# Altium footprint library 2.10-LQFP封装.PcbLib: 97 footprints (part 2 of 7)
Each footprint in its own frame and in the unit in brackets; x right, y up, seen from the top. Pads: shape width x height; smd on the part's side, far side on the other; paste and mask are expansions set on the pad; w line width, h text height; cw(c..) or ccw(c..) is an arc to the next point about the centre after c.
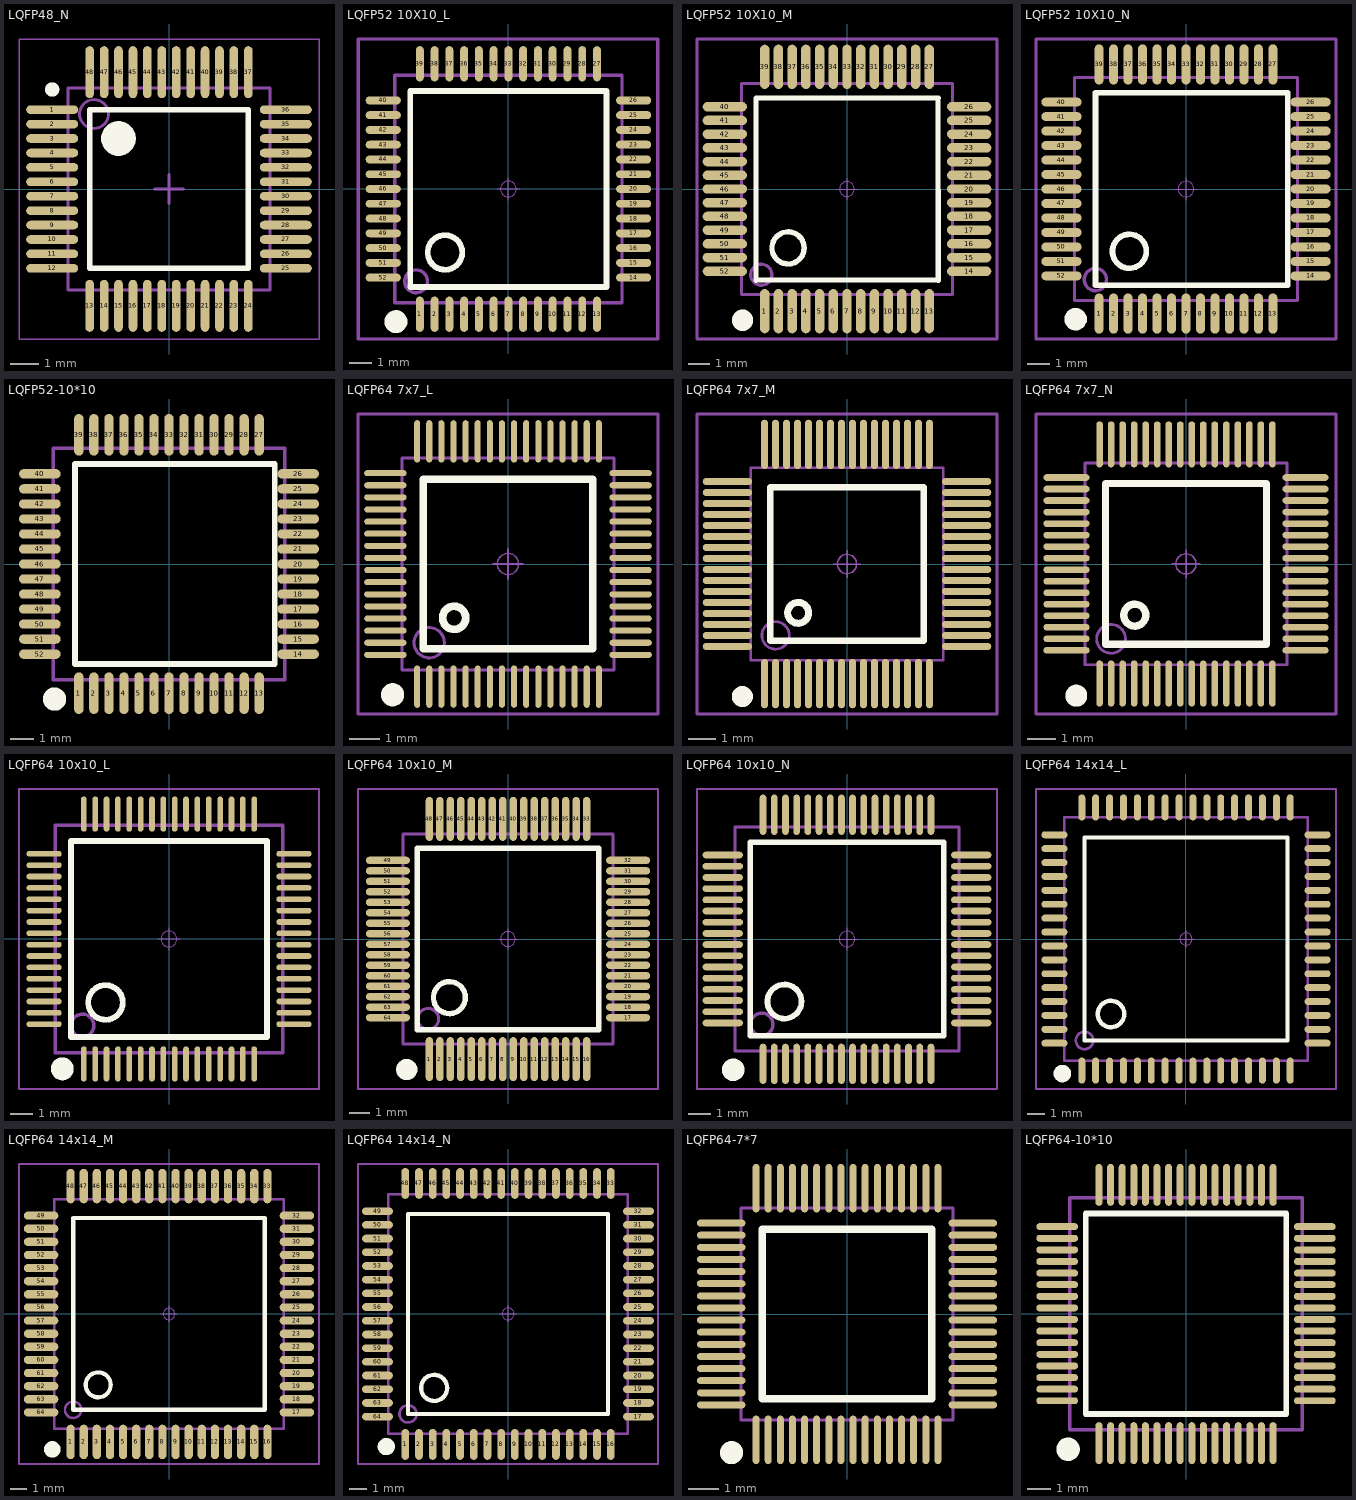
[diagram p1: the footprints below, top view; thin cyan lines are the x and y axes]

## LQFP48_N [mm] "封装库来自淘宝 ID：黄晶宝石 Thin QFP, 48-Leads, Body 7x7mm, Pitch 0.5mm, IPC Medium Density"
height 1.6
pads (48):
  oval 1.8x0.3 smd: 1(-4.05,2.75) 2(-4.05,2.25) 3(-4.05,1.75) 4(-4.05,1.25) 5(-4.05,0.75) 6(-4.05,0.25) 7(-4.05,-0.25) 8(-4.05,-0.75) 9(-4.05,-1.25) 10(-4.05,-1.75) 11(-4.05,-2.25) 12(-4.05,-2.75) 25(4.05,-2.75) 26(4.05,-2.25) 27(4.05,-1.75) 28(4.05,-1.25) 29(4.05,-0.75) 30(4.05,-0.25) 31(4.05,0.25) 32(4.05,0.75) 33(4.05,1.25) 34(4.05,1.75) 35(4.05,2.25) 36(4.05,2.75)
  oval 0.3x1.8 smd: 13(-2.75,-4.05) 14(-2.25,-4.05) 15(-1.75,-4.05) 16(-1.25,-4.05) 17(-0.75,-4.05) 18(-0.25,-4.05) 19(0.25,-4.05) 20(0.75,-4.05) 21(1.25,-4.05) 22(1.75,-4.05) 23(2.25,-4.05) 24(2.75,-4.05) 37(2.75,4.05) 38(2.25,4.05) 39(1.75,4.05) 40(1.25,4.05) 41(0.75,4.05) 42(0.25,4.05) 43(-0.25,4.05) 44(-0.75,4.05) 45(-1.25,4.05) 46(-1.75,4.05) 47(-2.25,4.05) 48(-2.75,4.05)
Top Overlay:
  circle w0.6: c-1.75,1.75 r0.3
  circle w0.25: c-4.05,3.45 r0.125
  lines w0.2: -2.75,-2.75 2.75,-2.75 2.75,2.75 -2.75,2.75 -2.75,-2.75
Mechanical 13:
  circle w0.1: c-2.6,2.6 r0.5
  lines w0.1: -3.5,-3.5 3.5,-3.5 3.5,3.5 -3.5,3.5 -3.5,-3.5
Mechanical 15:
  lines w0.05: -5.2,-5.2 5.2,-5.2 5.2,5.2 -5.2,5.2 -5.2,-5.2
  lines w0.1: -0.5,0 0.5,0 ; 0,-0.5 0,0.5
3D body "LQFP48-7x7.STEP": height 1.45, standoff 0, extent -4.503,-4.503 4.503,4.503

## LQFP52 10X10_L [mm] "52脚，体宽10x10mm，脚距0.65mm"
height 1.6
pads (52):
  oval 0.35x1.55 smd: 1(-3.9,-5.512) 2(-3.25,-5.512) 3(-2.6,-5.512) 4(-1.95,-5.512) 5(-1.3,-5.512) 6(-0.65,-5.512) 7(0,-5.512) 8(0.65,-5.512) 9(1.3,-5.512) 10(1.95,-5.512) 11(2.6,-5.512) 12(3.25,-5.512) 13(3.9,-5.512) 27(3.9,5.512) 28(3.25,5.512) 29(2.6,5.512) 30(1.95,5.512) 31(1.3,5.512) 32(0.65,5.512) 33(0,5.512) 34(-0.65,5.512) 35(-1.3,5.512) 36(-1.95,5.512) 37(-2.6,5.512) 38(-3.25,5.512) 39(-3.9,5.512)
  oval 1.55x0.35 smd: 14(5.512,-3.9) 15(5.512,-3.25) 16(5.512,-2.6) 17(5.512,-1.95) 18(5.512,-1.3) 19(5.512,-0.65) 20(5.512,0) 21(5.512,0.65) 22(5.512,1.3) 23(5.512,1.95) 24(5.512,2.6) 25(5.512,3.25) 26(5.512,3.9) 40(-5.512,3.9) 41(-5.512,3.25) 42(-5.512,2.6) 43(-5.512,1.95) 44(-5.512,1.3) 45(-5.512,0.65) 46(-5.512,0) 47(-5.512,-0.65) 48(-5.512,-1.3) 49(-5.512,-1.95) 50(-5.512,-2.6) 51(-5.512,-3.25) 52(-5.512,-3.9)
Top Overlay:
  circle w0.508: c-4.953,-5.842 r0.25
  circle w0.254: c-2.794,-2.794 r0.762
  lines w0.254: -4.318,-4.318 4.318,-4.318 4.318,4.318 -4.318,4.318 -4.318,-4.318
Mechanical 13:
  circle w0.15: c-4.064,-4.064 r0.5
  lines w0.15: -5,-5 -5,5 5,5 5,-5 -5,-5
Mechanical 15:
  circle w0.05: c0,0 r0.35
  lines w0.05: -0.5,0 0.5,0 ; 0,-0.5 0,0.5
  lines w0.15: -6.604,-6.604 -6.604,6.604 6.567,6.604 6.567,-6.604 -6.604,-6.604
3D body "LQFP52-10x10.STEP": height 1.45, standoff -0.01, extent -6.003,-6.003 6.003,6.003

## LQFP52 10X10_M [mm] "52脚，体宽10x10mm，脚距0.65mm"
height 1.6
pads (52):
  oval 0.45x2.1 smd: 1(-3.9,-5.791) 2(-3.25,-5.791) 3(-2.6,-5.791) 4(-1.95,-5.791) 5(-1.3,-5.791) 6(-0.65,-5.791) 7(0,-5.791) 8(0.65,-5.791) 9(1.3,-5.791) 10(1.95,-5.791) 11(2.6,-5.791) 12(3.25,-5.791) 13(3.9,-5.791) 27(3.9,5.791) 28(3.25,5.791) 29(2.6,5.791) 30(1.95,5.791) 31(1.3,5.791) 32(0.65,5.791) 33(0,5.791) 34(-0.65,5.791) 35(-1.3,5.791) 36(-1.95,5.791) 37(-2.6,5.791) 38(-3.25,5.791) 39(-3.9,5.791)
  oval 2.1x0.45 smd: 14(5.791,-3.9) 15(5.791,-3.25) 16(5.791,-2.6) 17(5.791,-1.95) 18(5.791,-1.3) 19(5.791,-0.65) 20(5.791,0) 21(5.791,0.65) 22(5.791,1.3) 23(5.791,1.95) 24(5.791,2.6) 25(5.791,3.25) 26(5.791,3.9) 40(-5.791,3.9) 41(-5.791,3.25) 42(-5.791,2.6) 43(-5.791,1.95) 44(-5.791,1.3) 45(-5.791,0.65) 46(-5.791,0) 47(-5.791,-0.65) 48(-5.791,-1.3) 49(-5.791,-1.95) 50(-5.791,-2.6) 51(-5.791,-3.25) 52(-5.791,-3.9)
Top Overlay:
  circle w0.254: c-2.794,-2.794 r0.762
  circle w0.508: c-4.953,-6.223 r0.25
  lines w0.254: -4.318,-4.318 -4.318,4.318 4.318,4.318 4.318,-4.318 -4.318,-4.318
Mechanical 13:
  circle w0.15: c-4.064,-4.064 r0.5
  lines w0.15: -5,-5 -5,5 5,5 5,-5 -5,-5
Mechanical 15:
  circle w0.05: c0,0 r0.35
  lines w0.05: -0.5,0 0.5,0 ; 0,-0.5 0,0.5
  lines w0.15: -7.112,-7.112 -7.112,7.112 7.112,7.112 7.112,-7.112 -7.112,-7.112
3D body "LQFP52-10x10.STEP": height 1.45, standoff -0.01, extent -6.003,-6.003 6.003,6.003

## LQFP52 10X10_N [mm] "52脚，体宽10x10mm，脚距0.65mm"
height 1.6
pads (52):
  oval 0.4x1.8 smd: 1(-3.9,-5.588) 2(-3.25,-5.588) 3(-2.6,-5.588) 4(-1.95,-5.588) 5(-1.3,-5.588) 6(-0.65,-5.588) 7(0,-5.588) 8(0.65,-5.588) 9(1.3,-5.588) 10(1.95,-5.588) 11(2.6,-5.588) 12(3.25,-5.588) 13(3.9,-5.588) 27(3.9,5.588) 28(3.25,5.588) 29(2.6,5.588) 30(1.95,5.588) 31(1.3,5.588) 32(0.65,5.588) 33(0,5.588) 34(-0.65,5.588) 35(-1.3,5.588) 36(-1.95,5.588) 37(-2.6,5.588) 38(-3.25,5.588) 39(-3.9,5.588)
  oval 1.8x0.4 smd: 14(5.588,-3.9) 15(5.588,-3.25) 16(5.588,-2.6) 17(5.588,-1.95) 18(5.588,-1.3) 19(5.588,-0.65) 20(5.588,0) 21(5.588,0.65) 22(5.588,1.3) 23(5.588,1.95) 24(5.588,2.6) 25(5.588,3.25) 26(5.588,3.9) 40(-5.588,3.9) 41(-5.588,3.25) 42(-5.588,2.6) 43(-5.588,1.95) 44(-5.588,1.3) 45(-5.588,0.65) 46(-5.588,0) 47(-5.588,-0.65) 48(-5.588,-1.3) 49(-5.588,-1.95) 50(-5.588,-2.6) 51(-5.588,-3.25) 52(-5.588,-3.9)
Top Overlay:
  circle w0.508: c-4.953,-5.842 r0.25
  circle w0.254: c-2.54,-2.794 r0.762
  lines w0.254: -4.064,-4.318 4.572,-4.318 4.572,4.318 -4.064,4.318 -4.064,-4.318
Mechanical 13:
  circle w0.15: c-4.064,-4.064 r0.5
  lines w0.15: -5,-5 5,-5 5,5 -5,5 -5,-5
Mechanical 15:
  circle w0.05: c0,0 r0.35
  lines w0.05: -0.5,0 0.5,0 ; 0,-0.5 0,0.5
  lines w0.15: -6.731,-6.731 6.731,-6.731 6.731,6.731 -6.731,6.731 -6.731,-6.731
3D body "LQFP52-10x10.STEP": height 1.45, standoff -0.01, extent -6.003,-6.003 6.003,6.003

## LQFP52-10*10 [mm] "10x10mm，0.65mm       淘宝ID:黄晶宝石"
height 1.6
pads (52):
  oval 0.4x1.8 smd: 1(-3.9,-5.588) 2(-3.25,-5.588) 3(-2.6,-5.588) 4(-1.95,-5.588) 5(-1.3,-5.588) 6(-0.65,-5.588) 7(0,-5.588) 8(0.65,-5.588) 9(1.3,-5.588) 10(1.95,-5.588) 11(2.6,-5.588) 12(3.25,-5.588) 13(3.9,-5.588) 27(3.9,5.588) 28(3.25,5.588) 29(2.6,5.588) 30(1.95,5.588) 31(1.3,5.588) 32(0.65,5.588) 33(0,5.588) 34(-0.65,5.588) 35(-1.3,5.588) 36(-1.95,5.588) 37(-2.6,5.588) 38(-3.25,5.588) 39(-3.9,5.588)
  oval 1.8x0.4 smd: 14(5.588,-3.9) 15(5.588,-3.25) 16(5.588,-2.6) 17(5.588,-1.95) 18(5.588,-1.3) 19(5.588,-0.65) 20(5.588,0) 21(5.588,0.65) 22(5.588,1.3) 23(5.588,1.95) 24(5.588,2.6) 25(5.588,3.25) 26(5.588,3.9) 40(-5.588,3.9) 41(-5.588,3.25) 42(-5.588,2.6) 43(-5.588,1.95) 44(-5.588,1.3) 45(-5.588,0.65) 46(-5.588,0) 47(-5.588,-0.65) 48(-5.588,-1.3) 49(-5.588,-1.95) 50(-5.588,-2.6) 51(-5.588,-3.25) 52(-5.588,-3.9)
Top Overlay:
  circle w0.508: c-4.953,-5.842 r0.25
  lines w0.254: -4.064,-4.318 -4.064,4.318 4.572,4.318 4.572,-4.318 -4.064,-4.318
Mechanical 13:
  lines w0.15: -5,-5 -5,5 5,5 5,-5 -5,-5
3D body "LQFP52-10x10.STEP": height 1.45, standoff 0, extent -6.003,-6.003 6.003,6.003

## LQFP64 7x7_L [mm] "64脚，体宽：7x7mm, 脚距：0.4mm"
pads (64):
  oval 0.2x1.4 smd: 1(-3,-4.048) 2(-2.6,-4.048) 3(-2.2,-4.048) 4(-1.8,-4.048) 5(-1.4,-4.048) 6(-1,-4.048) 7(-0.6,-4.048) 8(-0.2,-4.048) 9(0.2,-4.048) 10(0.6,-4.048) 11(1,-4.048) 12(1.4,-4.048) 13(1.8,-4.048) 14(2.2,-4.048) 15(2.6,-4.048) 16(3,-4.048) 33(3,4.048) 34(2.6,4.048) 35(2.2,4.048) 36(1.8,4.048) 37(1.4,4.048) 38(1,4.048) 39(0.6,4.048) 40(0.2,4.048) 41(-0.2,4.048) 42(-0.6,4.048) 43(-1,4.048) 44(-1.4,4.048) 45(-1.8,4.048) 46(-2.2,4.048) 47(-2.6,4.048) 48(-3,4.048)
  oval 1.4x0.2 smd: 17(4.048,-3) 18(4.048,-2.6) 19(4.048,-2.2) 20(4.048,-1.8) 21(4.048,-1.4) 22(4.048,-1) 23(4.048,-0.6) 24(4.048,-0.2) 25(4.048,0.2) 26(4.048,0.6) 27(4.048,1) 28(4.048,1.4) 29(4.048,1.8) 30(4.048,2.2) 31(4.048,2.6) 32(4.048,3) 49(-4.048,3) 50(-4.048,2.6) 51(-4.048,2.2) 52(-4.048,1.8) 53(-4.048,1.4) 54(-4.048,1) 55(-4.048,0.6) 56(-4.048,0.2) 57(-4.048,-0.2) 58(-4.048,-0.6) 59(-4.048,-1) 60(-4.048,-1.4) 61(-4.048,-1.8) 62(-4.048,-2.2) 63(-4.048,-2.6) 64(-4.048,-3)
Top Overlay:
  circle w0.254: c-1.778,-1.778 r0.381
  circle w0.508: c-3.81,-4.318 r0.127
  lines w0.254: -2.794,-2.794 2.794,-2.794 2.794,2.794 -2.794,2.794 -2.794,-2.794
Mechanical 13:
  circle w0.1: c-2.6,-2.6 r0.5
  lines w0.1: -3.5,-3.5 3.5,-3.5 3.5,3.5 -3.5,3.5 -3.5,-3.5
Mechanical 15:
  circle w0.05: c0,0 r0.35
  lines w0.05: -0.5,0 0.5,0 ; 0,-0.5 0,0.5
  lines w0.1: -4.953,-4.953 -4.953,4.953 4.953,4.953 4.953,-4.953 -4.953,-4.953
3D body "LQFP64-7x7.STEP": height 1.45, standoff 0, extent -4.503,-4.503 4.503,4.503

## LQFP64 7x7_M [mm] "64脚，体宽：7x7mm, 脚距：0.4mm"
pads (64):
  oval 0.26x1.8 smd: 1(-3,-4.352) 2(-2.6,-4.352) 3(-2.2,-4.352) 4(-1.8,-4.352) 5(-1.4,-4.352) 6(-1,-4.352) 7(-0.6,-4.352) 8(-0.2,-4.352) 9(0.2,-4.352) 10(0.6,-4.352) 11(1,-4.352) 12(1.4,-4.352) 13(1.8,-4.352) 14(2.2,-4.352) 15(2.6,-4.352) 16(3,-4.352) 33(3,4.352) 34(2.6,4.352) 35(2.2,4.352) 36(1.8,4.352) 37(1.4,4.352) 38(1,4.352) 39(0.6,4.352) 40(0.2,4.352) 41(-0.2,4.352) 42(-0.6,4.352) 43(-1,4.352) 44(-1.4,4.352) 45(-1.8,4.352) 46(-2.2,4.352) 47(-2.6,4.352) 48(-3,4.352)
  oval 1.8x0.26 smd: 17(4.352,-3) 18(4.352,-2.6) 19(4.352,-2.2) 20(4.352,-1.8) 21(4.352,-1.4) 22(4.352,-1) 23(4.352,-0.6) 24(4.352,-0.2) 25(4.352,0.2) 26(4.352,0.6) 27(4.352,1) 28(4.352,1.4) 29(4.352,1.8) 30(4.352,2.2) 31(4.352,2.6) 32(4.352,3) 49(-4.352,3) 50(-4.352,2.6) 51(-4.352,2.2) 52(-4.352,1.8) 53(-4.352,1.4) 54(-4.352,1) 55(-4.352,0.6) 56(-4.352,0.2) 57(-4.352,-0.2) 58(-4.352,-0.6) 59(-4.352,-1) 60(-4.352,-1.4) 61(-4.352,-1.8) 62(-4.352,-2.2) 63(-4.352,-2.6) 64(-4.352,-3)
Top Overlay:
  circle w0.254: c-1.778,-1.778 r0.381
  circle w0.508: c-3.81,-4.826 r0.127
  lines w0.254: -2.794,-2.794 2.794,-2.794 2.794,2.794 -2.794,2.794 -2.794,-2.794
Mechanical 13:
  circle w0.1: c-2.6,-2.6 r0.5
  lines w0.1: -3.5,-3.5 3.5,-3.5 3.5,3.5 -3.5,3.5 -3.5,-3.5
Mechanical 15:
  circle w0.05: c0,0 r0.35
  lines w0.05: -0.5,0 0.5,0 ; 0,-0.5 0,0.5
  lines w0.1: -5.461,-5.461 -5.461,5.461 5.461,5.461 5.461,-5.461 -5.461,-5.461
3D body "LQFP64-7x7.STEP": height 1.45, standoff 0, extent -4.503,-4.503 4.503,4.503

## LQFP64 7x7_N [mm] "64脚，体宽：7x7mm, 脚距：0.4mm"
pads (64):
  oval 0.23x1.6 smd: 1(-3,-4.146) 2(-2.6,-4.146) 3(-2.2,-4.146) 4(-1.8,-4.146) 5(-1.4,-4.146) 6(-1,-4.146) 7(-0.6,-4.146) 8(-0.2,-4.146) 9(0.2,-4.146) 10(0.6,-4.146) 11(1,-4.146) 12(1.4,-4.146) 13(1.8,-4.146) 14(2.2,-4.146) 15(2.6,-4.146) 16(3,-4.146) 33(3,4.152) 34(2.6,4.152) 35(2.2,4.152) 36(1.8,4.152) 37(1.4,4.152) 38(1,4.152) 39(0.6,4.152) 40(0.2,4.152) 41(-0.2,4.152) 42(-0.6,4.152) 43(-1,4.152) 44(-1.4,4.152) 45(-1.8,4.152) 46(-2.2,4.152) 47(-2.6,4.152) 48(-3,4.152)
  oval 1.6x0.23 smd: 17(4.149,-2.997) 18(4.149,-2.597) 19(4.149,-2.197) 20(4.149,-1.797) 21(4.149,-1.397) 22(4.149,-0.997) 23(4.149,-0.597) 24(4.149,-0.197) 25(4.149,0.203) 26(4.149,0.603) 27(4.149,1.003) 28(4.149,1.403) 29(4.149,1.803) 30(4.149,2.203) 31(4.149,2.603) 32(4.149,3.003) 49(-4.149,3.003) 50(-4.149,2.603) 51(-4.149,2.203) 52(-4.149,1.803) 53(-4.149,1.403) 54(-4.149,1.003) 55(-4.149,0.603) 56(-4.149,0.203) 57(-4.149,-0.197) 58(-4.149,-0.597) 59(-4.149,-0.997) 60(-4.149,-1.397) 61(-4.149,-1.797) 62(-4.149,-2.197) 63(-4.149,-2.597) 64(-4.149,-2.997)
Top Overlay:
  circle w0.254: c-1.778,-1.775 r0.381
  circle w0.508: c-3.81,-4.572 r0.127
  lines w0.254: -2.794,-2.791 2.794,-2.791 2.794,2.797 -2.794,2.797 -2.794,-2.791
Mechanical 13:
  circle w0.1: c-2.6,-2.597 r0.5
  lines w0.1: -3.5,-3.497 3.5,-3.497 3.5,3.503 -3.5,3.503 -3.5,-3.497
Mechanical 15:
  circle w0.05: c0,0.003 r0.35
  lines w0.05: -0.5,0.003 0.5,0.003 ; 0,-0.497 0,0.503
  lines w0.1: -5.207,-5.207 -5.207,5.207 5.207,5.207 5.207,-5.207 -5.207,-5.207
3D body "LQFP64-7x7.STEP": height 1.45, standoff 0, extent -4.503,-4.5 4.503,4.506

## LQFP64 10x10_L [mm] "64脚，体宽10x10mm，脚距0.5mm"
height 1.6
pads (64):
  oval 0.25x1.55 smd: 1(-3.75,-5.5) 2(-3.25,-5.5) 3(-2.75,-5.5) 4(-2.25,-5.5) 5(-1.75,-5.5) 6(-1.25,-5.5) 7(-0.75,-5.5) 8(-0.25,-5.5) 9(0.25,-5.5) 10(0.75,-5.5) 11(1.25,-5.5) 12(1.75,-5.5) 13(2.25,-5.5) 14(2.75,-5.5) 15(3.25,-5.5) 16(3.75,-5.5) 33(3.75,5.5) 34(3.25,5.5) 35(2.75,5.5) 36(2.25,5.5) 37(1.75,5.5) 38(1.25,5.5) 39(0.75,5.5) 40(0.25,5.5) 41(-0.25,5.5) 42(-0.75,5.5) 43(-1.25,5.5) 44(-1.75,5.5) 45(-2.25,5.5) 46(-2.75,5.5) 47(-3.25,5.5) 48(-3.75,5.5)
  oval 1.55x0.25 smd: 17(5.5,-3.75) 18(5.5,-3.25) 19(5.5,-2.75) 20(5.5,-2.25) 21(5.5,-1.75) 22(5.5,-1.25) 23(5.5,-0.75) 24(5.5,-0.25) 25(5.5,0.25) 26(5.5,0.75) 27(5.5,1.25) 28(5.5,1.75) 29(5.5,2.25) 30(5.5,2.75) 31(5.5,3.25) 32(5.5,3.75) 49(-5.499,3.75) 50(-5.499,3.25) 51(-5.499,2.75) 52(-5.499,2.25) 53(-5.499,1.75) 54(-5.499,1.25) 55(-5.499,0.75) 56(-5.499,0.25) 57(-5.499,-0.25) 58(-5.499,-0.75) 59(-5.499,-1.25) 60(-5.499,-1.75) 61(-5.499,-2.25) 62(-5.499,-2.75) 63(-5.499,-3.25) 64(-5.499,-3.75)
Top Overlay:
  circle w0.254: c-2.794,-2.794 r0.762
  circle w0.508: c-4.699,-5.715 r0.25
  lines w0.254: -4.318,-4.318 -4.318,4.318 4.318,4.318 4.318,-4.318 -4.318,-4.318
Mechanical 13:
  circle w0.15: c-3.81,-3.81 r0.5
  lines w0.15: -5,-5 -5,5 5,5 5,-5 -5,-5
Mechanical 15:
  circle w0.05: c0,0 r0.35
  lines w0.05: -0.5,0 0.5,0 ; 0,-0.5 0,0.5
  lines w0.1: -6.604,-6.604 -6.604,6.604 6.604,6.604 6.604,-6.604 -6.604,-6.604
3D body "LQFP64-10x10.STEP": height 1.45, standoff -0.01, extent -6.003,-6.003 6.003,6.003

## LQFP64 10x10_M [mm] "64脚，体宽10x10mm，脚距0.5mm         淘宝ID:黄晶宝石"
height 1.6
pads (64):
  oval 0.35x2.1 smd: 1(-3.75,-5.727) 2(-3.25,-5.727) 3(-2.75,-5.727) 4(-2.25,-5.727) 5(-1.75,-5.727) 6(-1.25,-5.727) 7(-0.75,-5.727) 8(-0.25,-5.727) 9(0.25,-5.727) 10(0.75,-5.727) 11(1.25,-5.727) 12(1.75,-5.727) 13(2.25,-5.727) 14(2.75,-5.727) 15(3.25,-5.727) 16(3.75,-5.727) 33(3.75,5.727) 34(3.25,5.727) 35(2.75,5.727) 36(2.25,5.727) 37(1.75,5.727) 38(1.25,5.727) 39(0.75,5.727) 40(0.25,5.727) 41(-0.25,5.727) 42(-0.75,5.727) 43(-1.25,5.727) 44(-1.75,5.727) 45(-2.25,5.727) 46(-2.75,5.727) 47(-3.25,5.727) 48(-3.75,5.727)
  oval 2.1x0.35 smd: 17(5.727,-3.75) 18(5.727,-3.25) 19(5.727,-2.75) 20(5.727,-2.25) 21(5.727,-1.75) 22(5.727,-1.25) 23(5.727,-0.75) 24(5.727,-0.25) 25(5.727,0.25) 26(5.727,0.75) 27(5.727,1.25) 28(5.727,1.75) 29(5.727,2.25) 30(5.727,2.75) 31(5.727,3.25) 32(5.727,3.75) 49(-5.727,3.75) 50(-5.727,3.25) 51(-5.727,2.75) 52(-5.727,2.25) 53(-5.727,1.75) 54(-5.727,1.25) 55(-5.727,0.75) 56(-5.727,0.25) 57(-5.727,-0.25) 58(-5.727,-0.75) 59(-5.727,-1.25) 60(-5.727,-1.75) 61(-5.727,-2.25) 62(-5.727,-2.75) 63(-5.727,-3.25) 64(-5.727,-3.75)
Top Overlay:
  circle w0.254: c-2.794,-2.794 r0.762
  circle w0.508: c-4.826,-6.223 r0.25
  lines w0.254: -4.318,-4.318 -4.318,4.318 4.318,4.318 4.318,-4.318 -4.318,-4.318
Mechanical 13:
  circle w0.15: c-3.81,-3.81 r0.5
  lines w0.15: -5,-5 -5,5 5,5 5,-5 -5,-5
Mechanical 15:
  circle w0.05: c0,0 r0.35
  lines w0.05: -0.5,0 0.5,0 ; 0,-0.5 0,0.5
  lines w0.1: -7.15,-7.15 7.15,-7.15 7.15,7.15 -7.15,7.15 -7.15,-7.15
3D body "LQFP64-10x10.STEP": height 1.45, standoff -0.01, extent -6.003,-6.003 6.003,6.003

## LQFP64 10x10_N [mm] "64脚，体宽10x10mm，脚距0.5mm      淘宝ID:黄晶宝石"
height 1.6
pads (64):
  oval 0.3x1.8 smd: 1(-3.75,-5.575) 2(-3.25,-5.575) 3(-2.75,-5.575) 4(-2.25,-5.575) 5(-1.75,-5.575) 6(-1.25,-5.575) 7(-0.75,-5.575) 8(-0.25,-5.575) 9(0.25,-5.575) 10(0.75,-5.575) 11(1.25,-5.575) 12(1.75,-5.575) 13(2.25,-5.575) 14(2.75,-5.575) 15(3.25,-5.575) 16(3.75,-5.575) 33(3.75,5.55) 34(3.25,5.55) 35(2.75,5.55) 36(2.25,5.55) 37(1.75,5.55) 38(1.25,5.55) 39(0.75,5.55) 40(0.25,5.55) 41(-0.25,5.55) 42(-0.75,5.55) 43(-1.25,5.55) 44(-1.75,5.55) 45(-2.25,5.55) 46(-2.75,5.55) 47(-3.25,5.55) 48(-3.75,5.55)
  oval 1.8x0.3 smd: 17(5.55,-3.75) 18(5.55,-3.25) 19(5.55,-2.75) 20(5.55,-2.25) 21(5.55,-1.75) 22(5.55,-1.25) 23(5.55,-0.75) 24(5.55,-0.25) 25(5.55,0.25) 26(5.55,0.75) 27(5.55,1.25) 28(5.55,1.75) 29(5.55,2.25) 30(5.55,2.75) 31(5.55,3.25) 32(5.55,3.75) 49(-5.55,3.75) 50(-5.55,3.25) 51(-5.55,2.75) 52(-5.55,2.25) 53(-5.55,1.75) 54(-5.55,1.25) 55(-5.55,0.75) 56(-5.55,0.25) 57(-5.55,-0.25) 58(-5.55,-0.75) 59(-5.55,-1.25) 60(-5.55,-1.75) 61(-5.55,-2.25) 62(-5.55,-2.75) 63(-5.55,-3.25) 64(-5.55,-3.75)
Top Overlay:
  circle w0.254: c-2.794,-2.794 r0.762
  circle w0.508: c-5.08,-5.842 r0.25
  lines w0.254: -4.318,-4.318 -4.318,4.318 4.318,4.318 4.318,-4.318 -4.318,-4.318
Mechanical 13:
  circle w0.15: c-3.81,-3.81 r0.5
  lines w0.15: -5,-5 -5,5 5,5 5,-5 -5,-5
Mechanical 15:
  circle w0.05: c0,0 r0.35
  lines w0.05: -0.5,0 0.5,0 ; 0,-0.5 0,0.5
  lines w0.1: -6.7,-6.7 6.7,-6.7 6.7,6.7 -6.7,6.7 -6.7,-6.7
3D body "LQFP64-10x10.STEP": height 1.45, standoff -0.01, extent -6.003,-6.003 6.003,6.003

## LQFP64 14x14_L [mm] "64脚，体宽14x14mm，脚距0.8mm"
height 1.6
pads (64):
  oval 0.4x1.5 smd: 1(-5.993,-7.576) 2(-5.193,-7.576) 3(-4.393,-7.576) 4(-3.593,-7.576) 5(-2.793,-7.576) 6(-1.993,-7.576) 7(-1.193,-7.576) 8(-0.393,-7.576) 9(0.407,-7.576) 10(1.207,-7.576) 11(2.007,-7.576) 12(2.807,-7.576) 13(3.607,-7.576) 14(4.407,-7.576) 15(5.207,-7.576) 16(6.007,-7.576) 33(6.007,7.576) 34(5.207,7.576) 35(4.407,7.576) 36(3.607,7.576) 37(2.807,7.576) 38(2.007,7.576) 39(1.207,7.576) 40(0.407,7.576) 41(-0.393,7.576) 42(-1.193,7.576) 43(-1.993,7.576) 44(-2.793,7.576) 45(-3.593,7.576) 46(-4.393,7.576) 47(-5.193,7.576) 48(-5.993,7.576)
  oval 1.5x0.4 smd: 17(7.583,-6) 18(7.583,-5.2) 19(7.583,-4.4) 20(7.583,-3.6) 21(7.583,-2.8) 22(7.583,-2) 23(7.583,-1.2) 24(7.583,-0.4) 25(7.583,0.4) 26(7.583,1.2) 27(7.583,2) 28(7.583,2.8) 29(7.583,3.6) 30(7.583,4.4) 31(7.583,5.2) 32(7.583,6) 49(-7.569,6) 50(-7.569,5.2) 51(-7.569,4.4) 52(-7.569,3.6) 53(-7.569,2.8) 54(-7.569,2) 55(-7.569,1.2) 56(-7.569,0.4) 57(-7.569,-0.4) 58(-7.569,-1.2) 59(-7.569,-2) 60(-7.569,-2.8) 61(-7.569,-3.6) 62(-7.569,-4.4) 63(-7.569,-5.2) 64(-7.569,-6)
Top Overlay:
  circle w0.254: c-4.311,-4.318 r0.762
  circle w0.508: c-7.112,-7.747 r0.25
  lines w0.254: -5.835,-5.842 5.849,-5.842 5.849,5.842 -5.835,5.842 -5.835,-5.842
Mechanical 13:
  circle w0.15: c-5.835,-5.842 r0.5
  lines w0.15: -6.993,-7 -6.993,7 7.007,7 7.007,-7 -6.993,-7
Mechanical 15:
  circle w0.05: c0.007,0 r0.35
  lines w0.05: -0.493,0 0.507,0 ; 0.007,-0.5 0.007,0.5
  lines w0.1: -8.629,-8.636 -8.629,8.636 8.643,8.636 8.643,-8.636 -8.629,-8.636
3D body "LQFP64-14x14.STEP": height 1.45, standoff -0.01, extent -7.996,-8.003 8.01,8.003

## LQFP64 14x14_M [mm] "64脚，体宽14x14mm，脚距0.8mm"
height 1.6
pads (64):
  oval 0.5x2.1 smd: 1(-6,-7.799) 2(-5.2,-7.799) 3(-4.4,-7.799) 4(-3.6,-7.799) 5(-2.8,-7.799) 6(-2,-7.799) 7(-1.2,-7.799) 8(-0.4,-7.799) 9(0.4,-7.799) 10(1.2,-7.799) 11(2,-7.799) 12(2.8,-7.799) 13(3.6,-7.799) 14(4.4,-7.799) 15(5.2,-7.799) 16(6,-7.799) 33(6,7.799) 34(5.2,7.799) 35(4.4,7.799) 36(3.6,7.799) 37(2.8,7.799) 38(2,7.799) 39(1.2,7.799) 40(0.4,7.799) 41(-0.4,7.799) 42(-1.2,7.799) 43(-2,7.799) 44(-2.8,7.799) 45(-3.6,7.799) 46(-4.4,7.799) 47(-5.2,7.799) 48(-6,7.799)
  oval 2.1x0.5 smd: 17(7.799,-6) 18(7.799,-5.2) 19(7.799,-4.4) 20(7.799,-3.6) 21(7.799,-2.8) 22(7.799,-2) 23(7.799,-1.2) 24(7.799,-0.4) 25(7.799,0.4) 26(7.799,1.2) 27(7.799,2) 28(7.799,2.8) 29(7.799,3.6) 30(7.799,4.4) 31(7.799,5.2) 32(7.799,6) 49(-7.799,6) 50(-7.799,5.2) 51(-7.799,4.4) 52(-7.799,3.6) 53(-7.799,2.8) 54(-7.799,2) 55(-7.799,1.2) 56(-7.799,0.4) 57(-7.799,-0.4) 58(-7.799,-1.2) 59(-7.799,-2) 60(-7.799,-2.8) 61(-7.799,-3.6) 62(-7.799,-4.4) 63(-7.799,-5.2) 64(-7.799,-6)
Top Overlay:
  circle w0.254: c-4.318,-4.318 r0.762
  circle w0.508: c-7.112,-8.255 r0.25
  lines w0.254: -5.842,-5.842 5.842,-5.842 5.842,5.842 -5.842,5.842 -5.842,-5.842
Mechanical 13:
  circle w0.15: c-5.842,-5.842 r0.5
  lines w0.15: -7,-7 7,-7 7,7 -7,7 -7,-7
Mechanical 15:
  circle w0.05: c0,0 r0.35
  lines w0.05: -0.5,0 0.5,0 ; 0,-0.5 0,0.5
  lines w0.1: -9.144,-9.144 9.144,-9.144 9.144,9.144 -9.144,9.144 -9.144,-9.144
3D body "LQFP64-14x14.STEP": height 1.45, standoff -0.01, extent -8.003,-8.003 8.003,8.003

## LQFP64 14x14_N [mm] "64脚，体宽14x14mm，脚距0.8mm"
height 1.6
pads (64):
  oval 0.45x1.8 smd: 1(-6,-7.617) 2(-5.2,-7.617) 3(-4.4,-7.617) 4(-3.6,-7.617) 5(-2.8,-7.617) 6(-2,-7.617) 7(-1.2,-7.617) 8(-0.4,-7.617) 9(0.4,-7.617) 10(1.2,-7.617) 11(2,-7.617) 12(2.8,-7.617) 13(3.6,-7.617) 14(4.4,-7.617) 15(5.2,-7.617) 16(6,-7.617) 33(6,7.629) 34(5.2,7.629) 35(4.4,7.629) 36(3.6,7.629) 37(2.8,7.629) 38(2,7.629) 39(1.2,7.629) 40(0.4,7.629) 41(-0.4,7.629) 42(-1.2,7.629) 43(-2,7.629) 44(-2.8,7.629) 45(-3.6,7.629) 46(-4.4,7.629) 47(-5.2,7.629) 48(-6,7.629)
  oval 1.8x0.45 smd: 17(7.623,-5.994) 18(7.623,-5.194) 19(7.623,-4.394) 20(7.623,-3.594) 21(7.623,-2.794) 22(7.623,-1.994) 23(7.623,-1.194) 24(7.623,-0.394) 25(7.623,0.406) 26(7.623,1.206) 27(7.623,2.006) 28(7.623,2.806) 29(7.623,3.606) 30(7.623,4.406) 31(7.623,5.206) 32(7.623,6.006) 49(-7.623,6.006) 50(-7.623,5.206) 51(-7.623,4.406) 52(-7.623,3.606) 53(-7.623,2.806) 54(-7.623,2.006) 55(-7.623,1.206) 56(-7.623,0.406) 57(-7.623,-0.394) 58(-7.623,-1.194) 59(-7.623,-1.994) 60(-7.623,-2.794) 61(-7.623,-3.594) 62(-7.623,-4.394) 63(-7.623,-5.194) 64(-7.623,-5.994)
Top Overlay:
  circle w0.254: c-4.318,-4.318 r0.762
  circle w0.508: c-7.112,-7.747 r0.25
  lines w0.254: -5.842,-5.842 5.842,-5.842 5.842,5.842 -5.842,5.842 -5.842,-5.842
Mechanical 13:
  circle w0.15: c-5.842,-5.836 r0.5
  lines w0.15: -7,-6.994 -7,7.006 7,7.006 7,-6.994 -7,-6.994
Mechanical 15:
  circle w0.05: c0,0.006 r0.35
  lines w0.05: -0.5,0.006 0.5,0.006 ; 0,-0.494 0,0.506
  lines w0.1: -8.763,-8.763 -8.763,8.763 8.763,8.763 8.763,-8.763 -8.763,-8.763
3D body "LQFP64-14x14.STEP": height 1.45, standoff -0.01, extent -8.003,-7.997 8.003,8.008

## LQFP64-7*7 [mm] "7x7mm, 0.4mm       淘宝ID:黄晶宝石"
pads (64):
  oval 0.23x1.6 smd: 1(-3,-4.146) 2(-2.6,-4.146) 3(-2.2,-4.146) 4(-1.8,-4.146) 5(-1.4,-4.146) 6(-1,-4.146) 7(-0.6,-4.146) 8(-0.2,-4.146) 9(0.2,-4.146) 10(0.6,-4.146) 11(1,-4.146) 12(1.4,-4.146) 13(1.8,-4.146) 14(2.2,-4.146) 15(2.6,-4.146) 16(3,-4.146) 33(3,4.152) 34(2.6,4.152) 35(2.2,4.152) 36(1.8,4.152) 37(1.4,4.152) 38(1,4.152) 39(0.6,4.152) 40(0.2,4.152) 41(-0.2,4.152) 42(-0.6,4.152) 43(-1,4.152) 44(-1.4,4.152) 45(-1.8,4.152) 46(-2.2,4.152) 47(-2.6,4.152) 48(-3,4.152)
  oval 1.6x0.23 smd: 17(4.149,-2.997) 18(4.149,-2.597) 19(4.149,-2.197) 20(4.149,-1.797) 21(4.149,-1.397) 22(4.149,-0.997) 23(4.149,-0.597) 24(4.149,-0.197) 25(4.149,0.203) 26(4.149,0.603) 27(4.149,1.003) 28(4.149,1.403) 29(4.149,1.803) 30(4.149,2.203) 31(4.149,2.603) 32(4.149,3.003) 49(-4.149,3.003) 50(-4.149,2.603) 51(-4.149,2.203) 52(-4.149,1.803) 53(-4.149,1.403) 54(-4.149,1.003) 55(-4.149,0.603) 56(-4.149,0.203) 57(-4.149,-0.197) 58(-4.149,-0.597) 59(-4.149,-0.997) 60(-4.149,-1.397) 61(-4.149,-1.797) 62(-4.149,-2.197) 63(-4.149,-2.597) 64(-4.149,-2.997)
Top Overlay:
  circle w0.508: c-3.81,-4.572 r0.127
  lines w0.254: -2.794,-2.791 2.794,-2.791 2.794,2.797 -2.794,2.797 -2.794,-2.791
Mechanical 13:
  lines w0.1: -3.5,-3.497 3.5,-3.497 3.5,3.503 -3.5,3.503 -3.5,-3.497
3D body "LQFP64-7x7.STEP": height 1.45, standoff 0, extent -4.503,-4.503 4.503,4.503

## LQFP64-10*10 [mm] "10x10mm，0.5mm       淘宝ID:黄晶宝石"
height 1.6
pads (64):
  oval 0.3x1.8 smd: 1(-3.75,-5.575) 2(-3.25,-5.575) 3(-2.75,-5.575) 4(-2.25,-5.575) 5(-1.75,-5.575) 6(-1.25,-5.575) 7(-0.75,-5.575) 8(-0.25,-5.575) 9(0.25,-5.575) 10(0.75,-5.575) 11(1.25,-5.575) 12(1.75,-5.575) 13(2.25,-5.575) 14(2.75,-5.575) 15(3.25,-5.575) 16(3.75,-5.575) 33(3.75,5.55) 34(3.25,5.55) 35(2.75,5.55) 36(2.25,5.55) 37(1.75,5.55) 38(1.25,5.55) 39(0.75,5.55) 40(0.25,5.55) 41(-0.25,5.55) 42(-0.75,5.55) 43(-1.25,5.55) 44(-1.75,5.55) 45(-2.25,5.55) 46(-2.75,5.55) 47(-3.25,5.55) 48(-3.75,5.55)
  oval 1.8x0.3 smd: 17(5.55,-3.75) 18(5.55,-3.25) 19(5.55,-2.75) 20(5.55,-2.25) 21(5.55,-1.75) 22(5.55,-1.25) 23(5.55,-0.75) 24(5.55,-0.25) 25(5.55,0.25) 26(5.55,0.75) 27(5.55,1.25) 28(5.55,1.75) 29(5.55,2.25) 30(5.55,2.75) 31(5.55,3.25) 32(5.55,3.75) 49(-5.55,3.75) 50(-5.55,3.25) 51(-5.55,2.75) 52(-5.55,2.25) 53(-5.55,1.75) 54(-5.55,1.25) 55(-5.55,0.75) 56(-5.55,0.25) 57(-5.55,-0.25) 58(-5.55,-0.75) 59(-5.55,-1.25) 60(-5.55,-1.75) 61(-5.55,-2.25) 62(-5.55,-2.75) 63(-5.55,-3.25) 64(-5.55,-3.75)
Top Overlay:
  circle w0.508: c-5.08,-5.842 r0.25
  lines w0.254: -4.318,-4.318 -4.318,4.318 4.318,4.318 4.318,-4.318 -4.318,-4.318
Mechanical 13:
  lines w0.15: -5,-5 -5,5 5,5 5,-5 -5,-5
3D body "LQFP64-10x10.STEP": height 1.45, standoff 0, extent -6.003,-6.003 6.003,6.003